# Altium schematic symbol library HI1206P121R-10.SchLib: 1 symbol
Pins are listed as number, name and electrical type; pins without a type are passive.

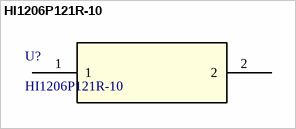
[diagram p0: symbol HI1206P121R-10]

## HI1206P121R-10
designator U?
Description; Manufacturer_Name: Laird; Copyright: Copyright (C) 2025 Ultra Librarian. All rights reserved.; Manufacturer_Part_Number: HI1206P121R-10; RefDes: RefDes; Type: Type
footprint HI1206P121R-10_LRD
pins: 1, 2